# EAGLE library part 6100XX11921_61001211921 (library WR-PHD)
WR-PHD 2.54 mm SMT Socket Header Article Properties Pins 4 unitless; 5 unitless; 6 unitless; 8 unitless; 10 unitless; 12 unitless; 14 unitless; 15 unitless; 16 unitless; 20 unitless; 24 unitless General Information General Information Operating Temperature -40 °C up to +105 °C; -40 °C up to +125 °C Compliance Lead free / RoHS Pitch 2.54 mm Durability 25 Mating cycles Rows Single Gender Socket Header Type Straight Type 1; Straight Type 2 Material Properties Insulator Material Nylon 46; PA 9T; PA9T Insulator Flammability Rating UL94 V-0 Contact Material Copper Alloy Contact Plating Gold Contact Type Stamped Certification UL Approval E323964 Packaging Properties Packaging Bag Electrical Properties IR 3 A Withstanding Voltage 500 V (AC) Contact Resistance 20 mΩ RISO 1000 MΩ <https://www.we-online.com/components/media/o64612v209%20Family_WR-PHD_6100xx13321.jpg> Details see: www.we-online.com/en/components/products/PHD_2_54_SMT_SOCKET_HEADER_6100XXXXX21 <www.we-online.com/catalog/PHD_2_54_SMT_SOCKET_HEADER_6100XXXXX21/?utm_source=eagle_model&utm_medium=description_link&utm_campaign=eisos_eagle> Updated by Ella 2024-01-31 2024 (C) Würth Elektronik
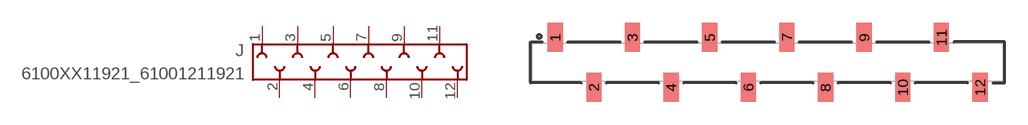
[diagram p222: symbol with the pads of 61001211921; footprint 61001211921]

Designator prefix J

## 6100XX11921_61001211921 (DATASHEET-URL: https://www.we-online.com/redexpert/spec/61001211921?ae; GENDER: Socket Header; IR: 3A; MOUNT: SMT; PACKAGING: Tube; PART-NUMBER: 61001211921; PINS: 12; PITCH: 2.54 mm; ROWS: Single; TYPE: Straight Type 1; VALUE: 61001211921)  [61001211921]
1  1  pas
2  2  pas
3  3  pas
4  4  pas
5  5  pas
6  6  pas
7  7  pas
8  8  pas
9  9  pas
10  10  pas
11  11  pas
12  12  pas

## Footprint 61001211921 (pad centres in mm)
WR-PHD 2.54 mm SMT Socket Header, 12 Pins
smd 1 x 1.91: 1 -13.97,1.645; 2 -11.43,-1.645; 3 -8.89,1.645; 4 -6.35,-1.645; 5 -3.81,1.645; 6 -1.27,-1.645; 7 1.27,1.645; 8 3.81,-1.645; 9 6.35,1.645; 10 8.89,-1.645; 11 11.43,1.645; 12 13.97,-1.645